# Altium footprint library Footprint.PcbLib: 154 footprints (part 8 of 10)
Each footprint in its own frame and in the unit in brackets; x right, y up, seen from the top. Pads: shape width x height; smd on the part's side, far side on the other; paste and mask are expansions set on the pad; w line width, h text height; cw(c..) or ccw(c..) is an arc to the next point about the centre after c.
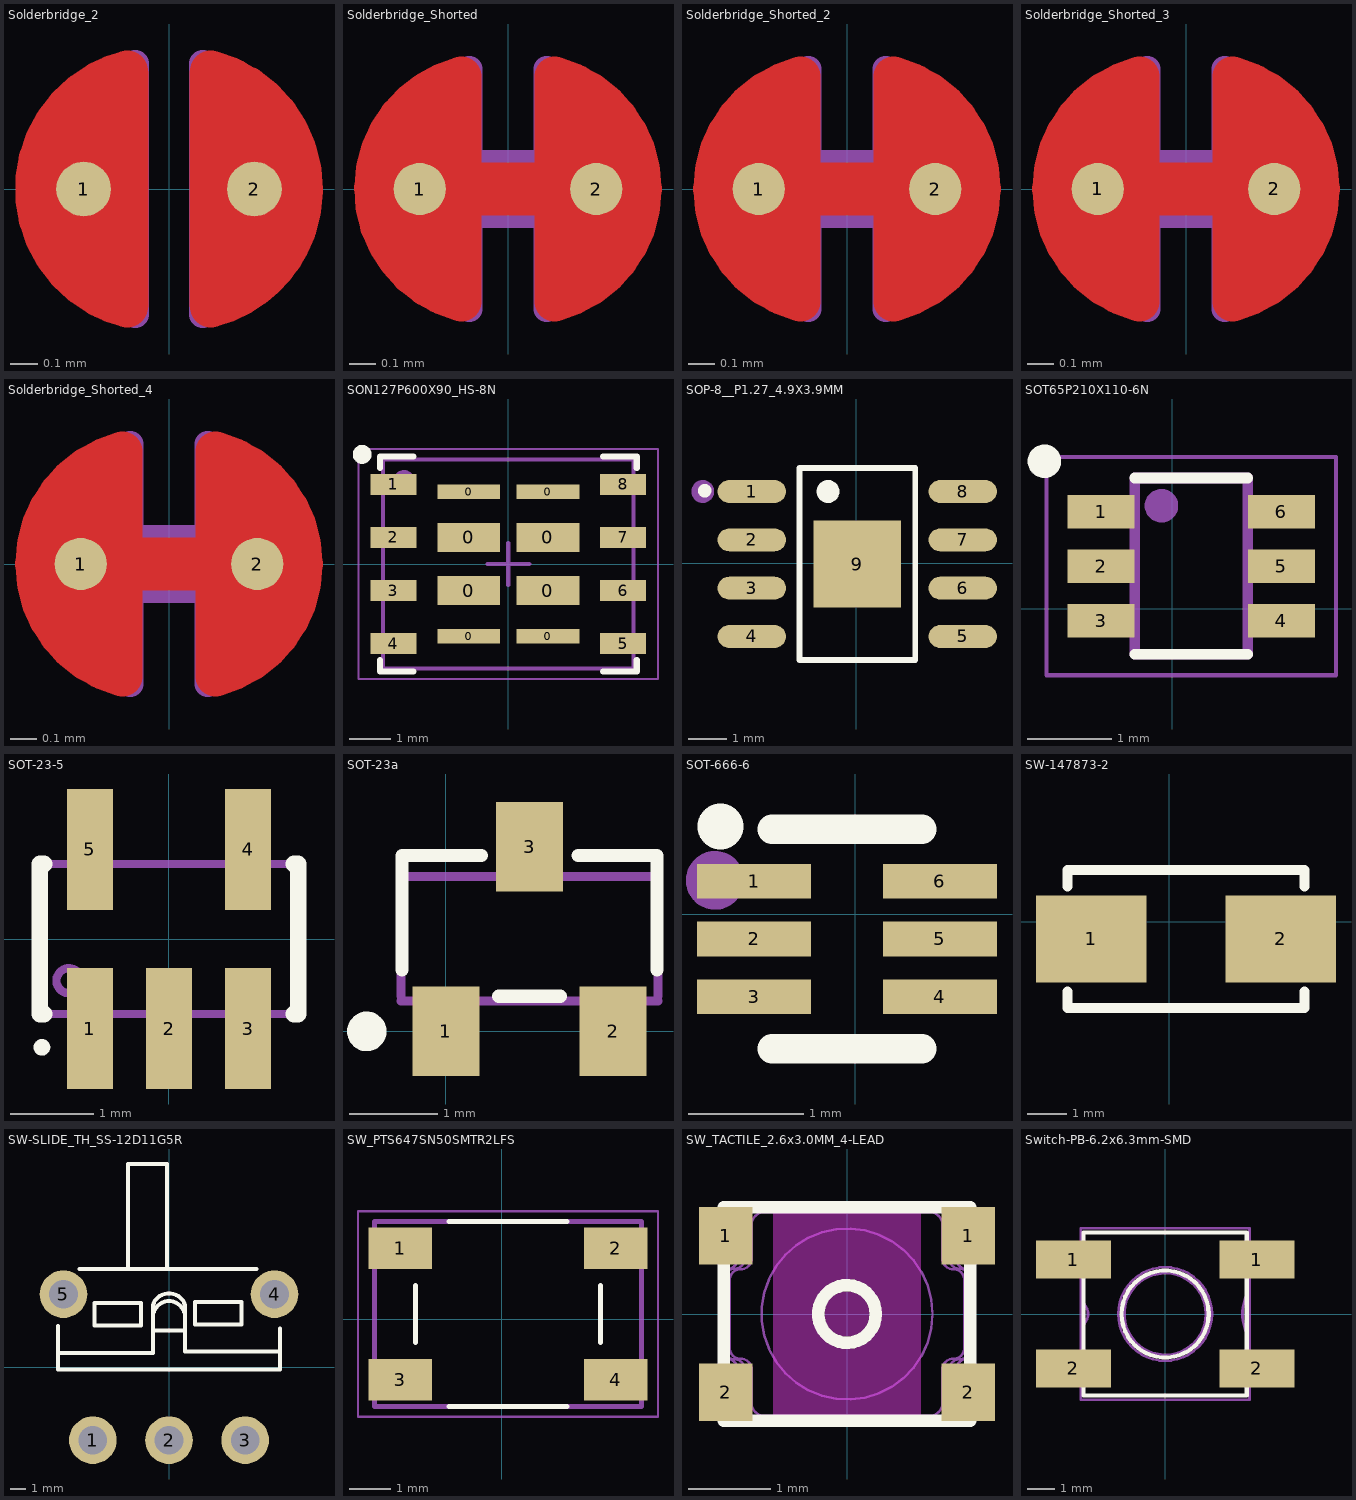
[diagram p7: the footprints below, top view; thin cyan lines are the x and y axes]

## Solderbridge_2 [mm]
pads (2):
  round 0.2 smd paste-10: 1(-0.312,0) 2(0.312,0)
Top Layer:
  region: 0.077,0.432 0.152,0.505 0.271,0.467 0.335,0.424 0.409,0.351 0.462,0.292 0.521,0.193 0.549,0.099 0.544,-0.122 0.518,-0.193 0.434,-0.33 0.351,-0.411 0.259,-0.469 0.157,-0.5 0.107,-0.483 0.077,-0.43
  region: -0.077,-0.432 -0.152,-0.505 -0.271,-0.467 -0.335,-0.424 -0.409,-0.351 -0.462,-0.292 -0.521,-0.193 -0.549,-0.099 -0.544,0.122 -0.518,0.193 -0.434,0.33 -0.351,0.411 -0.259,0.469 -0.157,0.5 -0.107,0.483 -0.077,0.43
  lines w0.152: -0.153,-0.431 cw(c-0.042,0) -0.254,-0.391 cw(c-0.042,0) -0.258,-0.389 cw(c-0.042,0) -0.258,0.389 cw(c-0.042,0) -0.254,0.391 cw(c-0.042,0) -0.153,0.431 ; 0.153,-0.431 ccw(c0.042,0) 0.312,-0.353 ccw(c0.042,0) 0.381,-0.288 ccw(c0.042,0) 0.461,-0.149 ccw(c0.042,0) 0.153,0.431
Top Solder:
  circle w0.61: c-0.003,0 r0.279
Mechanical 7:
  lines w0.1: -0.123,-0.459 cw(c-0.042,0) -0.123,0.459 -0.123,-0.459 ; 0.123,-0.459 ccw(c0.042,0) 0.123,0.459 0.123,-0.459
  text ".Designator" at -0.635,0.635 h0.38

## Solderbridge_Shorted [mm]
pads (2):
  round 0.2 smd paste-10: 1(-0.338,0) 2(0.338,0)
Top Layer:
  region: 0.102,0.432 0.178,0.505 0.296,0.467 0.361,0.424 0.434,0.351 0.488,0.292 0.546,0.193 0.574,0.099 0.569,-0.122 0.544,-0.193 0.46,-0.33 0.376,-0.411 0.284,-0.469 0.183,-0.5 0.132,-0.483 0.102,-0.43
  region: -0.102,-0.432 -0.178,-0.505 -0.296,-0.467 -0.361,-0.424 -0.434,-0.351 -0.488,-0.292 -0.546,-0.193 -0.574,-0.099 -0.569,0.122 -0.544,0.193 -0.46,0.33 -0.376,0.411 -0.284,0.469 -0.183,0.5 -0.132,0.483 -0.102,0.43
  lines w0.152: -0.178,-0.431 cw(c-0.068,0) -0.487,0.149 cw(c-0.068,0) -0.178,0.431 ; 0.178,-0.431 ccw(c0.068,0) 0.178,0.431
  lines w0.203: -0.338,0 0.338,0
Top Solder:
  circle w0.61: c-0.028,0 r0.279
  circle w0.61: c0.028,0 r0.279
Mechanical 7:
  lines w0.1: -0.148,-0.459 cw(c-0.067,0) -0.148,0.459 -0.148,0.1 0.148,0.1 0.148,0.459 cw(c0.067,0) 0.148,-0.459 0.148,-0.1 -0.148,-0.1 -0.148,-0.459
  text ".Designator" at -0.635,0.635 h0.38

## Solderbridge_Shorted_2 [mm]
pads (2):
  round 0.2 smd paste-10: 1(-0.338,0) 2(0.338,0)
Top Layer:
  region: -0.102,-0.432 -0.178,-0.505 -0.296,-0.467 -0.361,-0.424 -0.434,-0.351 -0.488,-0.292 -0.546,-0.193 -0.574,-0.099 -0.569,0.122 -0.544,0.193 -0.46,0.33 -0.376,0.411 -0.284,0.469 -0.183,0.5 -0.132,0.483 -0.102,0.43
  region: 0.102,0.432 0.178,0.505 0.296,0.467 0.361,0.424 0.434,0.351 0.488,0.292 0.546,0.193 0.574,0.099 0.569,-0.122 0.544,-0.193 0.46,-0.33 0.376,-0.411 0.284,-0.469 0.183,-0.5 0.132,-0.483 0.102,-0.43
  lines w0.152: -0.178,-0.431 cw(c-0.068,0) -0.178,0.431 ; 0.178,-0.431 ccw(c0.068,0) 0.178,0.431
  lines w0.203: -0.338,0 0.338,0
Top Solder:
  circle w0.61: c0.028,0 r0.279
  circle w0.61: c-0.028,0 r0.279
Mechanical 7:
  lines w0.1: -0.148,-0.459 cw(c-0.067,0) -0.148,0.459 -0.148,0.1 0.148,0.1 0.148,0.459 cw(c0.067,0) 0.148,-0.459 0.148,-0.1 -0.148,-0.1 -0.148,-0.459
  text ".Designator" at -0.635,0.635 h0.38

## Solderbridge_Shorted_3 [mm]
pads (2):
  round 0.2 smd paste-10: 1(-0.338,0) 2(0.338,0)
Top Layer:
  region: -0.102,-0.432 -0.178,-0.505 -0.296,-0.467 -0.361,-0.424 -0.434,-0.351 -0.488,-0.292 -0.546,-0.193 -0.574,-0.099 -0.569,0.122 -0.544,0.193 -0.46,0.33 -0.376,0.411 -0.284,0.469 -0.183,0.5 -0.132,0.483 -0.102,0.43
  region: 0.102,0.432 0.178,0.505 0.296,0.467 0.361,0.424 0.434,0.351 0.488,0.292 0.546,0.193 0.574,0.099 0.569,-0.122 0.544,-0.193 0.46,-0.33 0.376,-0.411 0.284,-0.469 0.183,-0.5 0.132,-0.483 0.102,-0.43
  lines w0.152: -0.178,-0.431 cw(c-0.068,0) -0.178,0.431 ; 0.178,-0.431 ccw(c0.068,0) 0.178,0.431
  lines w0.203: -0.338,0 0.338,0
Top Solder:
  circle w0.61: c-0.028,0 r0.279
  circle w0.61: c0.028,0 r0.279
Mechanical 7:
  lines w0.1: -0.148,-0.459 cw(c-0.067,0) -0.148,0.459 -0.148,0.1 0.148,0.1 0.148,0.459 cw(c0.067,0) 0.148,-0.459 0.148,-0.1 -0.148,-0.1 -0.148,-0.459
  text ".Designator" at -0.635,0.635 h0.38

## Solderbridge_Shorted_4 [mm]
pads (2):
  round 0.2 smd paste-10: 1(-0.338,0) 2(0.338,0)
Top Layer:
  region: -0.102,-0.432 -0.178,-0.505 -0.296,-0.467 -0.361,-0.424 -0.434,-0.351 -0.488,-0.292 -0.546,-0.193 -0.574,-0.099 -0.569,0.122 -0.544,0.193 -0.46,0.33 -0.376,0.411 -0.284,0.469 -0.183,0.5 -0.132,0.483 -0.102,0.43
  region: 0.102,0.432 0.178,0.505 0.296,0.467 0.361,0.424 0.434,0.351 0.488,0.292 0.546,0.193 0.574,0.099 0.569,-0.122 0.544,-0.193 0.46,-0.33 0.376,-0.411 0.284,-0.469 0.183,-0.5 0.132,-0.483 0.102,-0.43
  lines w0.152: -0.178,-0.431 cw(c-0.068,0) -0.178,0.431 ; 0.178,-0.431 ccw(c0.068,0) 0.178,0.431
  lines w0.203: -0.338,0 0.338,0
Top Solder:
  circle w0.61: c0.028,0 r0.279
  circle w0.61: c-0.028,0 r0.279
Mechanical 7:
  lines w0.1: -0.148,-0.459 cw(c-0.067,0) -0.148,0.459 -0.148,0.1 0.148,0.1 0.148,0.459 cw(c0.067,0) 0.148,-0.459 0.148,-0.1 -0.148,-0.1 -0.148,-0.459
  text ".Designator" at -0.635,0.635 h0.38

## SON127P600X90_HS-8N [mm]
pads (16):
  rect 1.5x0.35 smd: 0(-0.95,-1.73) 0(-0.95,1.73) 0(0.95,-1.73) 0(0.95,1.73)
  rect 1.5x0.7 smd: 0(-0.95,-0.635) 0(-0.95,0.635) 0(0.95,-0.635) 0(0.95,0.635)
  rect 1.1x0.5 smd: 1(-2.75,1.905) 2(-2.75,0.635) 3(-2.75,-0.635) 4(-2.75,-1.905) 5(2.75,-1.905) 6(2.75,-0.635) 7(2.75,0.635) 8(2.75,1.905)
Top Overlay:
  circle w0.25: c-3.5,2.625 r0.1
  lines w0.15: -3.075,-2.3 -3.075,-2.575 -2.27,-2.575 ; -3.075,2.3 -3.075,2.575 -2.27,2.575 ; 2.27,-2.575 3.075,-2.575 3.075,-2.3 ; 2.27,2.575 3.075,2.575 3.075,2.3
Mechanical 7:
  circle w0.1: c-2.5,2 r0.2
  lines w0.1: -3.001,-2.105 -3.111,-2.105 -3.111,-1.705 -3.001,-1.705 ; -3.001,-0.835 -3.111,-0.835 -3.111,-0.435 -3.001,-0.435 ; -3.001,0.435 -3.111,0.435 -3.111,0.835 -3.001,0.835 ; -3.001,1.705 -3.111,1.705 -3.111,2.105 -3.001,2.105 ; 3.001,-2.105 3.111,-2.105 3.111,-1.705 3.001,-1.705 ; 3.001,-0.835 3.111,-0.835 3.111,-0.435 3.001,-0.435 ; 3.001,0.435 3.111,0.435 3.111,0.835 3.001,0.835 ; 3.001,1.705 3.111,1.705 3.111,2.105 3.001,2.105 ; -3,-2.5 -3,2.5 3,2.5 3,-2.5 -3,-2.5
  text ".Designator" at -0.35,-0.15 h0.3
Mechanical 15:
  lines w0.05: -3.585,-2.75 -3.585,2.75 3.585,2.75 3.585,-2.75 -3.585,-2.75
  lines w0.1: -0.5,0 0.5,0 ; 0,-0.5 0,0.5
3D body "SON127P600X65_HS-9N.step": height 0.65, standoff 0, extent -3.001,-2.5 3.001,2.5

## SOP-8__P1.27_4.9X3.9MM [mm]
pads (9):
  oval 1.8x0.6 smd: 1(-2.747,1.88) 2(-2.747,0.61) 3(-2.747,-0.66) 4(-2.747,-1.93) 5(2.798,-1.93) 6(2.798,-0.66) 7(2.798,0.61) 8(2.798,1.88)
  rect 2.29x2.29 smd: 9(0.025,-0.025)
Top Overlay:
  circle w0.3: c-0.744,1.88 r0.15
  circle w0.3: c-3.986,1.901 r0.024
  lines w0.152: -1.496,-2.552 1.547,-2.552 1.547,2.501 -1.496,2.501 -1.496,-2.552
Mechanical 15:
  circle w0.3: c-4.039,1.88 r0.15
3D body "DDA0008J.stp": height 1.57, standoff 0, extent -2.988,-2.475 3.04,2.425

## SOT65P210X110-6N [mm]
pads (6):
  rect 0.8x0.4 smd: 1(-0.846,1.158) 2(-0.846,0.508) 3(-0.846,-0.142) 4(1.304,-0.142) 5(1.304,0.508) 6(1.304,1.158)
Top Overlay:
  circle w0.2: c-1.521,1.758 r0.1
  lines w0.127: -0.446,-0.542 0.904,-0.542 ; -0.446,1.558 0.904,1.558
Top Assembly:
  lines w0.05: -1.496,-0.792 1.954,-0.792 1.954,1.808 -1.496,1.808 -1.496,-0.792
Top Component Outline:
  circle w0.2: c-0.126,1.228 r0.1
  lines w0.127: -0.446,-0.542 0.904,-0.542 0.904,1.558 -0.446,1.558 -0.446,-0.542
3D body "SOT65P210X110-6N.step": height 1.1, standoff 0, extent -0.821,-0.542 1.279,1.558

## SOT-23-5 [mm]
pads (5):
  rect 0.55x1.45 smd: 1(-0.95,-1.075) 2(0,-1.075) 3(0.95,-1.075) 4(0.95,1.075) 5(-0.95,1.075)
Top Overlay:
  circle w0.1: c-1.525,-1.3 r0.05
  lines w0.2: -1.5,-0.9 -1.55,-0.9 -1.55,0.9 -1.5,0.9 ; 1.5,-0.9 1.55,-0.9 1.55,0.9 1.5,0.9
Mechanical 7:
  circle w0.1: c-1.2,-0.5 r0.15
  lines w0.1: -1.15,-0.9 -1.15,-1.5 -0.75,-1.5 -0.75,-0.9 ; -1.15,0.9 -1.15,1.5 -0.75,1.5 -0.75,0.9 ; -0.2,-0.9 -0.2,-1.5 0.2,-1.5 0.2,-0.9 ; 0.75,-0.9 0.75,-1.5 1.15,-1.5 1.15,-0.9 ; 0.75,0.9 0.75,1.5 1.15,1.5 1.15,0.9 ; -1.5,-0.9 -1.5,0.9 1.5,0.9 1.5,-0.9 -1.5,-0.9
  text ".Designator" at -0.453,-0.189 h0.38
3D body "User Library-SOT23-5-1.step": height 1.3, standoff 0, extent -1.5,-1.5 1.5,1.5

## SOT-23a [mil]
pads (3):
  rect 30x40 smd: 1(0,0) 2(74.8,0) 3(37.4,82.68)
Top Overlay:
  circle w9.84: c-35.43,0 r3.94
  lines w5.91: -19.68,27.56 -19.68,78.74 15.75,78.74 ; 23.62,15.75 51.18,15.75 ; 59.06,78.74 94.49,78.74 94.49,27.56
Mechanical 7:
  lines w3.94: -20.07,13.56 94.89,13.56 ; -20.07,15.75 -20.07,69.32 94.89,69.32 94.89,15.75
  lines w4.02: -8.27,13.56 -8.27,-7.51 8.27,-7.51 8.27,13.56 ; 29.13,69.32 29.13,90.18 45.67,90.18 45.67,69.32 ; 66.54,13.56 66.54,-7.51 83.07,-7.51 83.07,13.56
  text ".Designator" at 16.48,34.51 h15
3D body "User Library-sot23-1.step": height 39.37, standoff 0, extent -20.07,-4.72 94.89,87.4

## SOT-666-6 [mm]
pads (6):
  rect 0.99x0.3 smd mask+0.04: 1(-0.877,0.286) 2(-0.877,-0.213) 3(-0.877,-0.714) 4(0.733,-0.714) 5(0.733,-0.213) 6(0.733,0.286)
Top Overlay:
  circle w0.4: c-1.168,0.762 r0
  lines w0.254: -0.722,-1.163 0.578,-1.163 ; -0.722,0.737 0.578,0.737
Mechanical 15:
  circle w0.254: c-1.215,0.294 r0.127
3D body "User Library-SOT50P160X60-6.step": height 0.6, standoff 0, extent -0.876,-0.999 0.724,0.592

## SW-147873-2 [mm]
pads (2):
  rect 2.8x2.2 smd paste+0 mask+0.051: 1(-1.978,-0.434) 2(2.822,-0.434)
Top Overlay:
  lines w0.254: -2.578,-1.766 -2.578,-2.184 3.422,-2.184 3.422,-1.766 ; -2.578,0.897 -2.578,1.316 3.422,1.316 3.422,0.897
3D body "147873-2.stp": height 4.6, standoff 0.1, extent -2.943,-2.131 3.857,1.369

## SW-SLIDE_TH_SS-12D11G5R [mm]
pads (5):
  round 3 hole 1.8: 1(-4.8,-4.6) 2(0,-4.6) 3(4.8,-4.6) 4(6.65,4.6) 5(-6.65,4.6)
Top Overlay:
  lines w0.254: -7,0.899 -1.016,0.899 -1.016,3.147 cw(c0,3.147) 1.016,3.147 1.016,0.988 7,0.988 ; -7,2.587 -7,-0.13 7,-0.13 7,2.434 ; -5.635,6.18 5.515,6.18 ; -2.578,6.18 -2.578,12.8 -0.127,12.799 ; -1.016,2.326 1.016,2.326 ; -1.016,2.923 -1.016,3.909 cw(c0,3.594) 1.016,3.909 1.016,2.923 ; -0.127,6.187 -0.127,12.807 ; -4.696,2.639 -1.778,2.639 -1.778,4.036 -4.696,4.036 -4.696,2.639 ; 1.651,2.702 4.575,2.702 4.575,4.099 1.651,4.099 1.651,2.702
Mechanical 15:
  lines w0.003: 1.079,3.544 1.08,3.544
3D body "ss-12d11g5r.stp": height 6.8, standoff -3, extent -6.807,-5.232 6.693,11.216

## SW_PTS647SN50SMTR2LFS [mm]
pads (4):
  rect 1.55x1 smd: 1(-2.473,1.727) 2(2.777,1.727) 3(-2.473,-1.473) 4(2.777,-1.473)
Top Overlay:
  lines w0.127: -2.099,-0.559 -2.099,0.814 ; -1.284,-2.123 1.589,-2.123 ; -1.284,2.377 1.589,2.377 ; 2.404,-0.56 2.404,0.813
Top Assembly:
  lines w0.05: -3.498,-2.373 -3.498,2.627 3.802,2.627 3.802,-2.373 -3.498,-2.373
Top Component Outline:
  lines w0.127: -3.098,-2.123 3.402,-2.123 3.402,2.377 -3.098,2.377 -3.098,-2.123
3D body "PTS647SN50SMTR2LFS.stp": height 5, standoff 0, extent -3.098,-2.123 3.402,2.377

## SW_TACTILE_2.6x3.0MM_4-LEAD [mm]
pads (4):
  rect 0.65x0.7 smd: 1(-1.475,0.95) 1(1.475,0.95) 2(-1.475,-0.95) 2(1.475,-0.95)
Top Layer keep-out:
  rectangle: -0.9,-1.3 0.9,1.3
Top Overlay:
  circle w0.152: c0,0 r0.35
  lines w0.152: -1.5,-1.3 -1.5,1.3 1.5,1.3 1.5,-1.3 -1.5,-1.3
Mechanical 7:
  circle w0.03: c0,0 r0.409
  circle w0.03: c0,0 r1.04
  lines w0.03: -1.595,-1.185 -1.595,-0.695 ; -1.595,0.695 -1.595,1.185 ; -1.48,-0.695 -1.48,-0.155 ; -1.48,-0.45 ccw(c-1.38,-0.45) -1.38,-0.55 -1.375,-0.55 cw(c-1.375,-0.685) -1.24,-0.685 -1.24,-1.19 ccw(c-1.14,-1.19) -1.14,-1.29 ; -1.479,-0.439 ccw(c-1.344,-0.439) -1.431,-0.542 -1.373,-0.582 cw(c-1.46,-0.685) -1.325,-0.685 -1.325,-1.185 -1.69,-1.185 -1.69,-0.695 -1.325,-0.695 ; -1.479,0.439 cw(c-1.344,0.439) -1.431,0.542 -1.373,0.582 ccw(c-1.46,0.685) -1.325,0.685 -1.325,1.185 -1.69,1.185 -1.69,0.695 -1.325,0.695 ; -1.48,0.45 cw(c-1.38,0.45) -1.38,0.55 -1.375,0.55 ccw(c-1.375,0.685) -1.24,0.685 -1.24,1.19 cw(c-1.14,1.19) -1.14,1.29 ; -1.48,0.695 -1.48,0.155 ; -1.358,-1.19 ccw(c-1.258,-1.19) -1.258,-1.29 1.258,-1.29 ccw(c1.258,-1.19) 1.358,-1.19 ; -1.358,1.19 cw(c-1.258,1.19) -1.258,1.29 1.258,1.29 cw(c1.258,1.19) 1.358,1.19 ; 1.14,-1.29 ccw(c1.14,-1.19) 1.24,-1.19 1.24,-0.685 cw(c1.375,-0.685) 1.375,-0.55 1.38,-0.55 ccw(c1.38,-0.45) 1.48,-0.45 ; 1.14,1.29 cw(c1.14,1.19) 1.24,1.19 1.24,0.685 ccw(c1.375,0.685) 1.375,0.55 1.38,0.55 cw(c1.38,0.45) 1.48,0.45 ; 1.325,-0.695 1.69,-0.695 1.69,-1.185 1.325,-1.185 1.325,-0.685 cw(c1.46,-0.685) 1.373,-0.582 1.431,-0.542 ccw(c1.344,-0.439) 1.479,-0.439 ; 1.325,0.695 1.69,0.695 1.69,1.185 1.325,1.185 1.325,0.685 ccw(c1.46,0.685) 1.373,0.582 1.431,0.542 cw(c1.344,0.439) 1.479,0.439 ; 1.48,-0.695 1.48,-0.155 ; 1.48,0.695 1.48,0.155 ; 1.595,-1.185 1.595,-0.695 ; 1.595,0.695 1.595,1.185 ; -1.48,0.155 -1.53,0.155 -1.53,-0.245 -1.48,-0.245 -1.48,0.155 ; 1.48,0.155 1.53,0.155 1.53,-0.245 1.48,-0.245 1.48,0.155 ; -1.429,-0.41 ccw(c-1.294,-0.41) -1.294,-0.545 cw(c-1.294,-0.68) -1.159,-0.68 -1.159,-1.089 ccw(c-1.009,-1.089) -1.009,-1.239 1.009,-1.239 ccw(c1.009,-1.089) 1.159,-1.089 1.159,-0.68 cw(c1.294,-0.68) 1.294,-0.545 ccw(c1.294,-0.41) 1.429,-0.41 1.429,0.41 ccw(c1.294,0.41) 1.294,0.545 cw(c1.294,0.68) 1.159,0.68 1.159,1.089 ccw(c1.009,1.089) 1.009,1.239 -1.009,1.239 ccw(c-1.009,1.089) -1.159,1.089 -1.159,0.68 cw(c-1.294,0.68) -1.294,0.545 ccw(c-1.294,0.41) -1.429,0.41 -1.429,-0.41
  text ".Designator" at -0.6,-0.875 h0.38
3D body: height 0.44, standoff 0, extent -1.5,-1.3 1.5,1.3
3D body: height 0.65, standoff 0.44, extent -0.347,-0.349 0.35,0.349
3D body: height 0.35, standoff 0, extent 1.495,0.7 1.595,1.2
3D body: height 0.35, standoff 0, extent 1.495,-1.2 1.595,-0.7
3D body: height 0.35, standoff 0, extent -1.595,-1.2 -1.495,-0.7
3D body: height 0.35, standoff 0, extent -1.595,0.7 -1.495,1.2

## Switch-PB-6.2x6.3mm-SMD [mm]
pads (4):
  rect 2.75x1.39 smd: 1(-3.375,2)
  rect 2.75x1.4 smd: 1(3.375,2) 2(-3.375,-2) 2(3.375,-2)
Top Overlay:
  circle w0.152: c0,0 r1.601
  lines w0.152: -3,-3 -3,3 3,3 3,-3 -3,-3
Mechanical 7:
  circle w0.1: c0,0 r1.721
  circle w0.1: c0,0 r1.5
  lines w0.1: -3.3,-2.393 -3.3,-1.606 ; -3.3,1.606 -3.3,2.393 ; -3.1,-2.393 -3.6,-2.393 -3.6,-1.606 -3.1,-1.606 ; -3.1,-0.441 ccw(c-3.335,0) -3.1,0.441 ; -3.1,1.606 -3.6,1.606 -3.6,2.393 -3.1,2.393 ; 3.1,-2.393 3.6,-2.393 3.6,-1.606 3.1,-1.606 ; 3.1,-0.91 cw(c4.561,0) 3.1,0.91 ; 3.1,1.606 3.6,1.606 3.6,2.393 3.1,2.393 ; 3.3,-2.393 3.3,-1.606 ; 3.3,1.606 3.3,2.393 ; -3.1,-3.15 -3.1,3.15 3.1,3.15 3.1,-3.15 -3.1,-3.15
  text ".Designator" at -0.475,-0.15 h0.38
3D body "Switch tact 6x6mm.stp": height 3.1, standoff 0, extent -4,-3 4,3.3